# Altium footprint library PCB_PACKAGE.PCBLIB: 1 footprints
Each footprint in its own frame and in the unit in brackets; x right, y up, seen from the top. Pads: shape width x height; smd on the part's side, far side on the other; paste and mask are expansions set on the pad; w line width, h text height; cw(c..) or ccw(c..) is an arc to the next point about the centre after c.
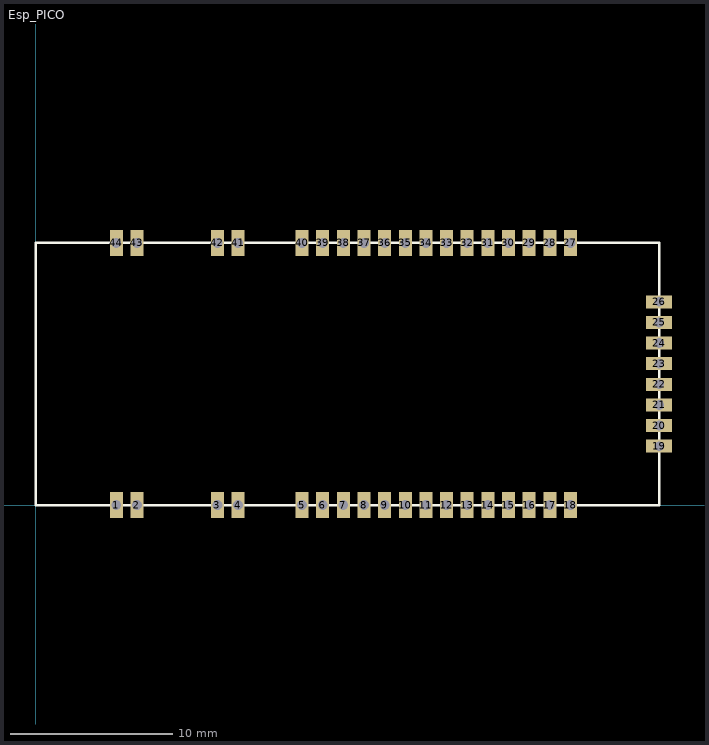
[diagram p0: the footprint, top view; thin cyan lines are the x and y axes]

## Esp_PICO [mm]
pads (44):
  rect 0.8x1.6 hole 0.6: 1(4.953,0) 2(6.223,0) 3(11.176,0) 4(12.446,0) 5(16.383,0) 6(17.653,0) 7(18.923,0) 8(20.193,0) 9(21.463,0) 10(22.733,0) 11(24.003,0) 12(25.273,0) 13(26.543,0) 14(27.813,0) 15(29.083,0) 16(30.353,0) 17(31.623,0) 18(32.893,0) 27(32.893,16.129) 28(31.623,16.129) 29(30.353,16.129) 30(29.083,16.129) 31(27.813,16.129) 32(26.543,16.129) 33(25.273,16.129) 34(24.003,16.129) 35(22.733,16.129) 36(21.463,16.129) 37(20.193,16.129) 38(18.923,16.129) 39(17.653,16.129) 40(16.383,16.129) 41(12.446,16.129) 42(11.176,16.129) 43(6.223,16.129) 44(4.953,16.129)
  rect 1.6x0.8 hole 0.6: 19(38.354,3.619) 20(38.354,4.889) 21(38.354,6.159) 22(38.354,7.429) 23(38.354,8.7) 24(38.354,9.97) 25(38.354,11.239) 26(38.354,12.509)
Top Overlay:
  lines w0.152: 0,0 38.354,0 38.354,16.129 0,16.129 0,0